# Altium footprint library GD32F103RCT6.PcbLib: 1 footprints
Each footprint in its own frame and in the unit in brackets; x right, y up, seen from the top. Pads: shape width x height; smd on the part's side, far side on the other; paste and mask are expansions set on the pad; w line width, h text height; cw(c..) or ccw(c..) is an arc to the next point about the centre after c.
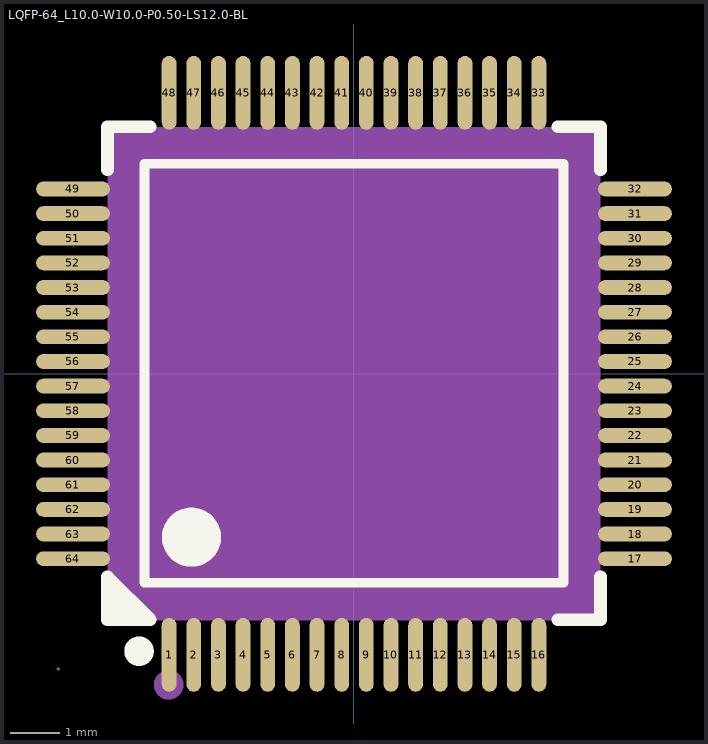
[diagram p0: the footprint, top view; thin cyan lines are the x and y axes]

## LQFP-64_L10.0-W10.0-P0.50-LS12.0-BL [mm]
pads (64):
  oval 0.3x1.5 smd paste+0 mask+0.051: 1(-3.75,-5.7) 2(-3.25,-5.7) 3(-2.75,-5.7) 4(-2.25,-5.7) 5(-1.75,-5.7) 6(-1.25,-5.7) 7(-0.75,-5.7) 8(-0.25,-5.7) 9(0.25,-5.7) 10(0.75,-5.7) 11(1.25,-5.7) 12(1.75,-5.7) 13(2.25,-5.7) 14(2.75,-5.7) 15(3.25,-5.7) 16(3.75,-5.7) 33(3.75,5.7) 34(3.25,5.7) 35(2.75,5.7) 36(2.25,5.7) 37(1.75,5.7) 38(1.25,5.7) 39(0.75,5.7) 40(0.25,5.7) 41(-0.25,5.7) 42(-0.75,5.7) 43(-1.25,5.7) 44(-1.75,5.7) 45(-2.25,5.7) 46(-2.75,5.7) 47(-3.25,5.7) 48(-3.75,5.7)
  oval 1.5x0.3 smd paste+0 mask+0.051: 17(5.7,-3.75) 18(5.7,-3.25) 19(5.7,-2.75) 20(5.7,-2.25) 21(5.7,-1.75) 22(5.7,-1.25) 23(5.7,-0.75) 24(5.7,-0.25) 25(5.7,0.25) 26(5.7,0.75) 27(5.7,1.25) 28(5.7,1.75) 29(5.7,2.25) 30(5.7,2.75) 31(5.7,3.25) 32(5.7,3.75) 49(-5.7,3.75) 50(-5.7,3.25) 51(-5.7,2.75) 52(-5.7,2.25) 53(-5.7,1.75) 54(-5.7,1.25) 55(-5.7,0.75) 56(-5.7,0.25) 57(-5.7,-0.25) 58(-5.7,-0.75) 59(-5.7,-1.25) 60(-5.7,-1.75) 61(-5.7,-2.25) 62(-5.7,-2.75) 63(-5.7,-3.25) 64(-5.7,-3.75)
Top Overlay:
  region: -4.131,-4.988 -5,-4.119 -5,-4.988
  lines w0.2: -4.25,-4.238 4.25,-4.238 4.25,4.262 -4.25,4.262 -4.25,-4.238
  lines w0.254: -5,4.143 -5,5.012 -4.131,5.012 ; 4.131,-4.988 5,-4.988 5,-4.119 ; 4.131,5.012 5,5.012 5,4.143 ; -5,-4.988 -5,-4.119 -4.131,-4.988 -5,-4.988
  lines w0.3: -4.361,-5.478 ccw(c-4.36,-5.628) -4.359,-5.478
  lines w0.6: -3.299,-3.013 ccw(c-3.297,-3.313) -3.294,-3.013
Mechanical 5:
  circle w0.3: c-3.76,-6.308 r0.15
Mechanical 9:
  region: -5,5 5,5 5,-5 -5,-5
Mechanical 10:
  drawing of 64 lines, arcs and shapes, not listed
Mechanical 11:
  region: -5.97,-5.988 -5.97,-5.991 -5.971,-5.997 -5.973,-6.002 -5.977,-6.007 -5.981,-6.011 -5.986,-6.015 -5.991,-6.017 -5.997,-6.018 -6.003,-6.018 -6.009,-6.017 -6.014,-6.015 -6.019,-6.011 -6.023,-6.007 -6.027,-6.002 -6.029,-5.997 -6.03,-5.991 -6.03,-5.988 -6.03,-5.985 -6.029,-5.979 -6.027,-5.974 -6.023,-5.969 -6.019,-5.965 -6.014,-5.962 -6.009,-5.959 -6.003,-5.958 -5.997,-5.958 -5.991,-5.959 -5.986,-5.962 -5.981,-5.965 -5.977,-5.969 -5.973,-5.974 -5.971,-5.979 -5.97,-5.985 -5.97,-5.988
Mechanical 12:
  drawing of 64 lines, arcs and shapes, not listed